# Altium schematic symbol library EVQ9P701P.SchLib: 1 symbol
Pins are listed as number, name and electrical type; pins without a type are passive.

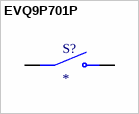
[diagram p0: symbol EVQ9P701P]

## EVQ9P701P
designator S?
MF: {'manufacturer': u'Panasonic Electronic Components'}; MP: EVQ9P701P; Package: None; Price: None; Value: *; Availability: Unavailable
footprint SW_EVQ9P701P
pins: 1_A NO, 1_B NO, 2_A NC, 2_B NC